# Altium footprint library AP63205WU-7.PcbLib: 3 footprints
Each footprint in its own frame and in the unit in brackets; x right, y up, seen from the top. Pads: shape width x height; smd on the part's side, far side on the other; paste and mask are expansions set on the pad; w line width, h text height; cw(c..) or ccw(c..) is an arc to the next point about the centre after c.
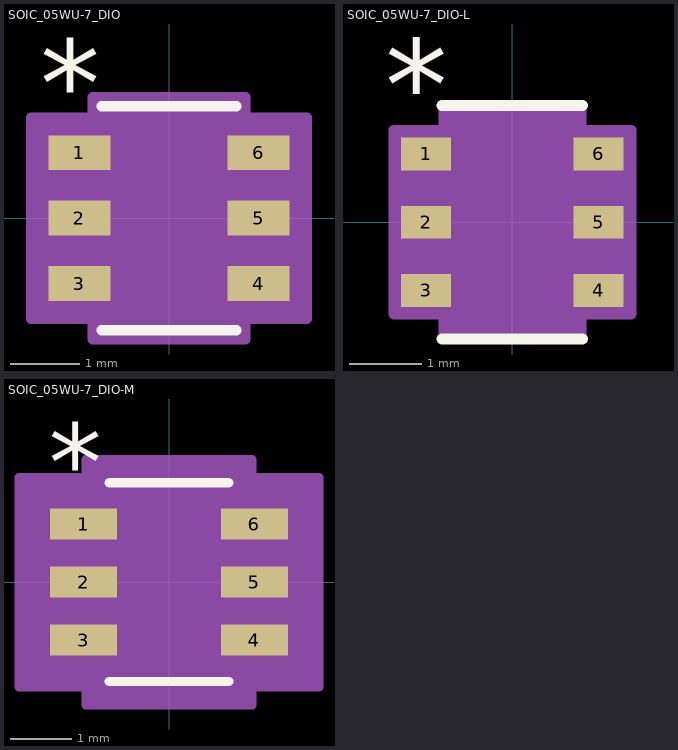
[diagram p0: the footprints below, top view; thin cyan lines are the x and y axes]

## SOIC_05WU-7_DIO [mm]
pads (6):
  rect 0.896x0.507 smd paste+0 mask+0: 1(-1.299,0.95) 2(-1.299,0) 3(-1.299,-0.95) 4(1.299,-0.95) 5(1.299,0) 6(1.299,0.95)
Top Overlay:
  lines w0.152: -0.978,-1.626 0.978,-1.626 ; -0.978,1.626 0.978,1.626
  text ".Designator" at -3.492,-0.635 h1.27
  text "*" at -1.87,1.33 h1.27
Mechanical 13:
  lines w0.025: -0.305,1.499 ccw(c0,1.499) 0.305,1.499 ; -1.397,-1.179 -1.397,-0.721 -0.851,-0.721 -0.851,-1.179 -1.397,-1.179 ; -1.397,-0.229 -1.397,0.229 -0.851,0.229 -0.851,-0.229 -1.397,-0.229 ; -1.397,0.721 -1.397,1.179 -0.851,1.179 -0.851,0.721 -1.397,0.721 ; -0.851,-1.499 0.851,-1.499 0.851,1.499 -0.851,1.499 -0.851,-1.499 ; 0.851,-1.179 0.851,-0.721 1.397,-0.721 1.397,-1.179 0.851,-1.179 ; 0.851,-0.229 0.851,0.229 1.397,0.229 1.397,-0.229 0.851,-0.229 ; 0.851,0.721 0.851,1.179 1.397,1.179 1.397,0.721 0.851,0.721
  text "*" at -0.787,0.152 h1.27
  text ".Designator" at -3.492,-0.635 h1.27
Mechanical 15:
  region: -1.105,-1.458 -2.001,-1.458 -2.001,1.458 -1.105,1.458 -1.105,1.753 1.105,1.753 1.105,1.458 2.001,1.458 2.001,-1.458 1.105,-1.458 1.105,-1.753 -1.105,-1.753
  lines w0.152: -2.001,-1.458 -2.001,1.458 -1.105,1.458 -1.105,1.753 1.105,1.753 1.105,1.458 2.001,1.458 2.001,-1.458 1.105,-1.458 1.105,-1.753 -1.105,-1.753 -1.105,-1.458 -2.001,-1.458
3D body "SOIC_05WU-7_DIO.step": height 0.99, standoff 0, extent -1.397,-1.499 1.397,1.499

## SOIC_05WU-7_DIO-L [mil]
pads (6):
  rect 27.41x18 smd paste+0 mask+0: 1(-47.2,37.4) 2(-47.2,0) 3(-47.2,-37.4) 4(47.2,-37.4) 5(47.2,0) 6(47.2,37.4)
Top Overlay:
  lines w6: -38.5,-64 38.5,-64 ; -38.5,64 38.5,64
  text ".Designator" at -137.5,-25 h50
  text "*" at -69.7,50.4 h50
Mechanical 13:
  lines w1: -12,59 ccw(c0,59) 12,59 ; -55,-46.4 -55,-28.4 -33.5,-28.4 -33.5,-46.4 -55,-46.4 ; -55,-9 -55,9 -33.5,9 -33.5,-9 -55,-9 ; -55,28.4 -55,46.4 -33.5,46.4 -33.5,28.4 -55,28.4 ; -33.5,-59 33.5,-59 33.5,59 -33.5,59 -33.5,-59 ; 33.5,-46.4 33.5,-28.4 55,-28.4 55,-46.4 33.5,-46.4 ; 33.5,-9 33.5,9 55,9 55,-9 33.5,-9 ; 33.5,28.4 33.5,46.4 55,46.4 55,28.4 33.5,28.4
  text "*" at -31,6 h50
  text ".Designator" at -137.5,-25 h50
Mechanical 15:
  region: -37.5,-50.4 -64.91,-50.4 -64.91,50.4 -37.5,50.4 -37.5,63 37.5,63 37.5,50.4 64.91,50.4 64.91,-50.4 37.5,-50.4 37.5,-63 -37.5,-63
  lines w6: -64.91,-50.4 -64.91,50.4 -37.5,50.4 -37.5,63 37.5,63 37.5,50.4 64.91,50.4 64.91,-50.4 37.5,-50.4 37.5,-63 -37.5,-63 -37.5,-50.4 -64.91,-50.4
3D body "SOIC_05WU-7_DIO.step": height 39.09, standoff 0, extent -55,-59.02 55,59.02

## SOIC_05WU-7_DIO-M [mm]
pads (6):
  rect 1.096x0.507 smd paste+0 mask+0: 1(-1.399,0.95) 2(-1.399,0) 3(-1.399,-0.95) 4(1.399,-0.95) 5(1.399,0) 6(1.399,0.95)
Top Overlay:
  lines w0.152: -0.978,-1.626 0.978,-1.626 ; -0.978,1.626 0.978,1.626
  text ".Designator" at -3.492,-0.635 h1.27
  text "*" at -1.97,1.33 h1.27
Mechanical 13:
  lines w0.025: -0.305,1.499 ccw(c0,1.499) 0.305,1.499 ; -1.397,-1.179 -1.397,-0.721 -0.851,-0.721 -0.851,-1.179 -1.397,-1.179 ; -1.397,-0.229 -1.397,0.229 -0.851,0.229 -0.851,-0.229 -1.397,-0.229 ; -1.397,0.721 -1.397,1.179 -0.851,1.179 -0.851,0.721 -1.397,0.721 ; -0.851,-1.499 0.851,-1.499 0.851,1.499 -0.851,1.499 -0.851,-1.499 ; 0.851,-1.179 0.851,-0.721 1.397,-0.721 1.397,-1.179 0.851,-1.179 ; 0.851,-0.229 0.851,0.229 1.397,0.229 1.397,-0.229 0.851,-0.229 ; 0.851,0.721 0.851,1.179 1.397,1.179 1.397,0.721 0.851,0.721
  text "*" at -0.787,0.152 h1.27
  text ".Designator" at -3.492,-0.635 h1.27
Mechanical 15:
  region: -1.359,-1.712 -2.455,-1.712 -2.455,1.712 -1.359,1.712 -1.359,2.007 1.359,2.007 1.359,1.712 2.455,1.712 2.455,-1.712 1.359,-1.712 1.359,-2.007 -1.359,-2.007
  lines w0.152: -2.455,-1.712 -2.455,1.712 -1.359,1.712 -1.359,2.007 1.359,2.007 1.359,1.712 2.455,1.712 2.455,-1.712 1.359,-1.712 1.359,-2.007 -1.359,-2.007 -1.359,-1.712 -2.455,-1.712
3D body "SOIC_05WU-7_DIO.step": height 0.99, standoff 0, extent -1.397,-1.499 1.397,1.499